# Altium schematic symbol library My_FOC_v1.SchLib: 14 symbols
Pins are listed as number, name and electrical type; pins without a type are passive.

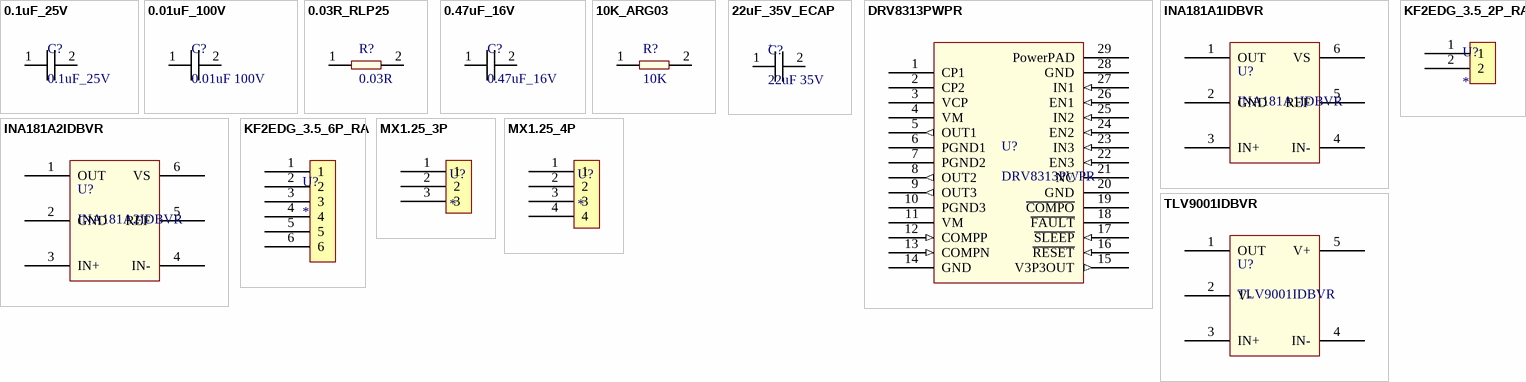
[diagram p0: symbols 0.1uF_25V to TLV9001IDBVR]

## 0.1uF_25V
designator C?
0603 X7R Ceramic Capacitor
footprint CAP_0603_1608
pins: 1, 2

## 0.01uF_100V
designator C?, comment 0.01uF 100V
0603 X7R Ceramic Capacitor
footprint CAP_0603_1608
pins: 1 2, 2

## 0.03R_RLP25
designator R?, comment 0.03R
大毅 RLP25 0.03R 2W采样电阻
footprint R2512_SHUNT_2P
pins: 1, 2

## 0.47uF_16V
designator C?
0603 X7R Ceramic Capacitor
footprint CAP_0603_1608
pins: 1, 2

## 10K_ARG03
designator R?, comment 10K
Viking ARG03DTC1002 0603 Thin Film Resistor
footprint RES_0603_1608
pins: 1, 2

## 22uF_35V_ECAP
designator C?, comment 22uF 35V
Polarized SMD Aluminum Electrolytic Capacitor
footprint ECAP_SMD_D5_H5.4
pins: 1, 2
text: +

## DRV8313PWPR
designator U?
Three Half-H-Bridge Motor Driver MAX 26V 2.5A
footprint HTSSOP-28 PowerPAD (Need to design Vias)
pins: 1 CP1, 2 CP2, 3 VCP, 4 VM (power), 5 OUT1 (out), 6 PGND1, 7 PGND2, 8 OUT2 (out), 9 OUT3 (out), 10 PGND3, 11 VM (power), 12 COMPP (in), 13 COMPN (in), 14 GND (power), 15 V3P3OUT (out), 16 ~{RESET} (in), 17 ~{SLEEP} (in), 18 ~{FAULT} (oc), 19 ~{COMPO} (oc), 20 GND (power), 21 NC, 22 EN3 (in), 23 IN3 (in), 24 EN2 (in), 25 IN2 (in), 26 EN1 (in), 27 IN1 (in), 28 GND (power), 29 PowerPAD

## INA181A1IDBVR
designator U?
Bidirectional Current Sense Amplifier
footprint SOT23-6_DBV
pins: 1 OUT, 2 GND, 3 IN+, 4 IN-, 5 REF, 6 VS

## INA181A2IDBVR
designator U?
Bidirectional Current Sense Amplifier
footprint SOT23-6_DBV
pins: 1 OUT, 2 GND, 3 IN+, 4 IN-, 5 REF, 6 VS

## KF2EDG_3.5_2P_RA
designator U?
footprint KF2EDG_3.5_2P_RA
pins: 1, 2

## KF2EDG_3.5_6P_RA
designator U?
footprint KF2EDG_3.5_6P_RA
pins: 1, 2, 3, 4, 5, 6

## MX1.25_3P
designator U?
footprint MX1.25_3P_SMT
pins: 1, 2, 3

## MX1.25_4P
designator U?
footprint MX1.25_4P_SMT
pins: 1, 2, 3, 4

## TLV9001IDBVR
designator U?
footprint SOT23-5_DBV
pins: 1 OUT, 2 V-, 3 IN+, 4 IN-, 5 V+